# Altium footprint library IndoorGuide_Anchor_Device_V1.0.0_draft.PcbLib: 17 footprints (part 1 of 2)
Each footprint in its own frame and in the unit in brackets; x right, y up, seen from the top. Pads: shape width x height; smd on the part's side, far side on the other; paste and mask are expansions set on the pad; w line width, h text height; cw(c..) or ccw(c..) is an arc to the next point about the centre after c.
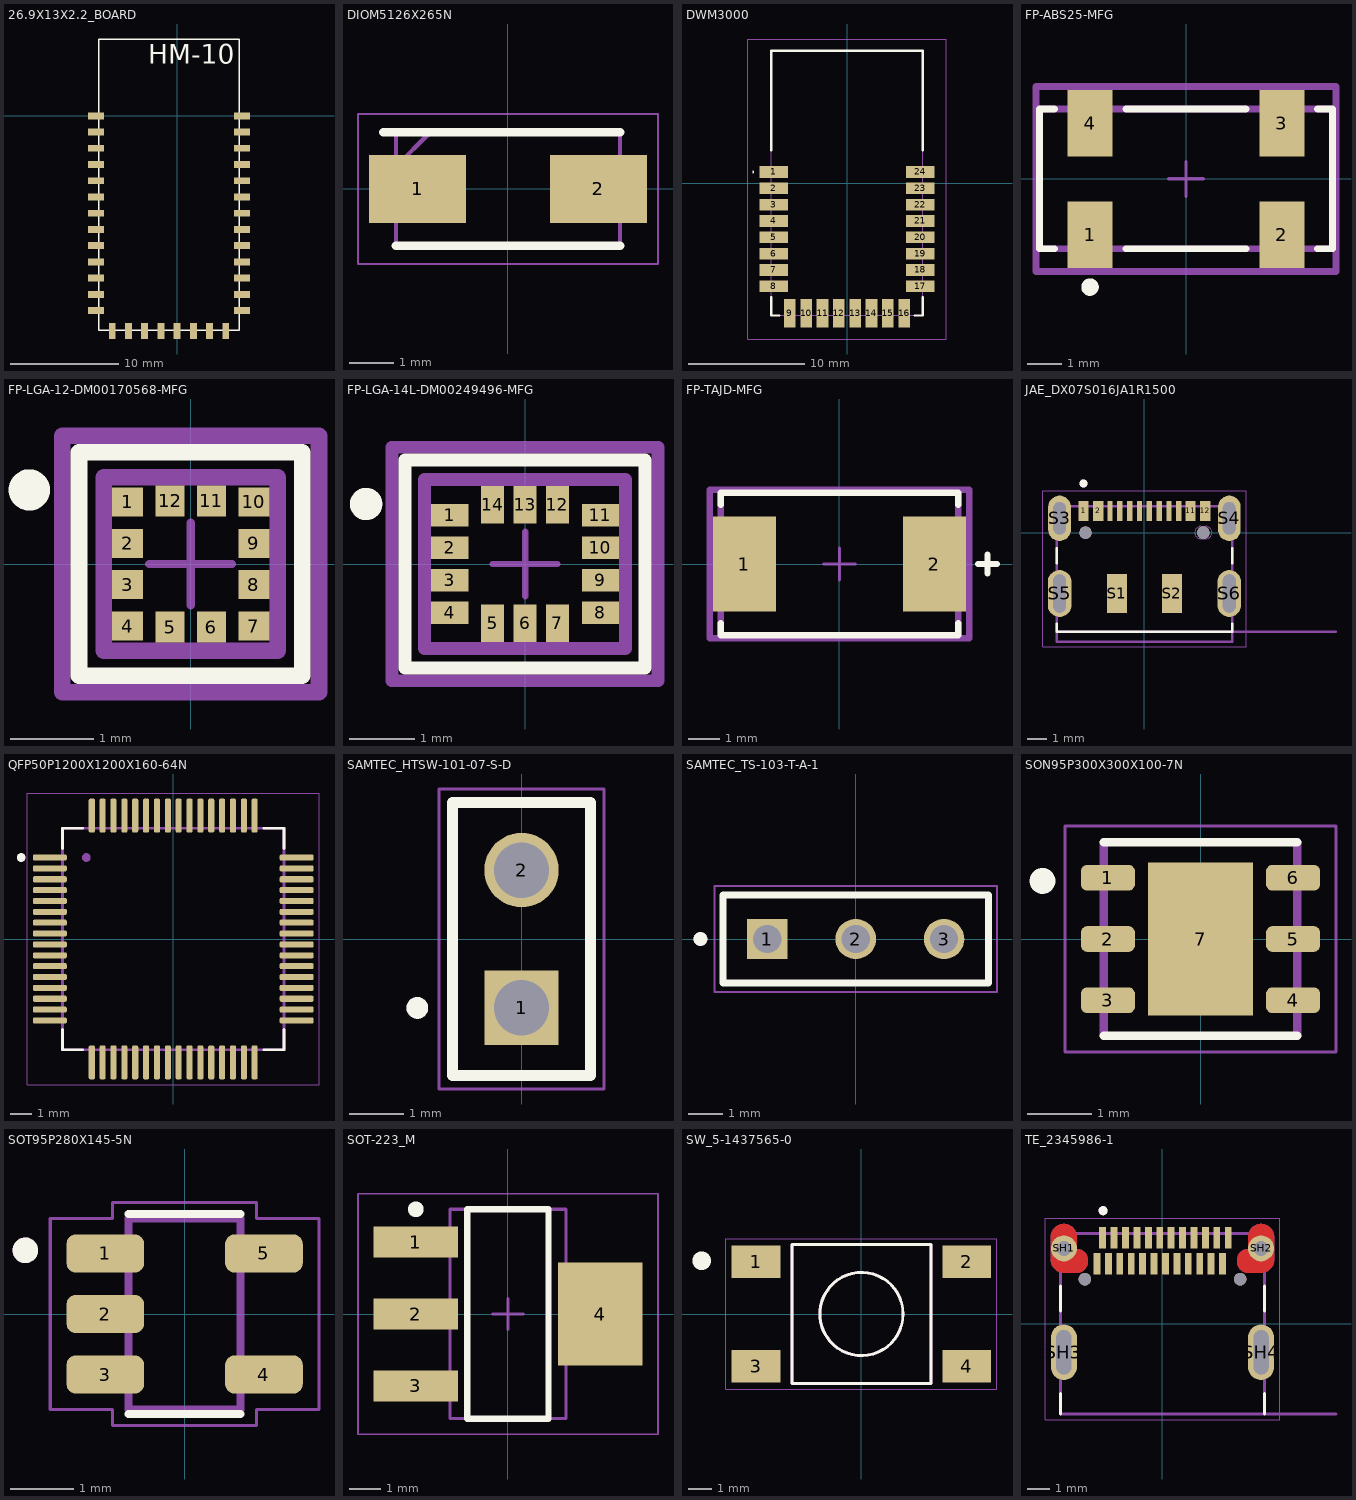
[diagram p0: the footprints below, top view; thin cyan lines are the x and y axes]

## 26.9X13X2.2_BOARD [mm]
pads (34):
  rect 1.5x0.635 smd: 1(-7.5,0) 2(-7.5,-1.5) 3(-7.5,-3) 4(-7.5,-4.5) 5(-7.5,-6) 6(-7.5,-7.5) 8(-7.5,-10.5) 9(-7.5,-12) 10(-7.5,-13.5) 11(-7.5,-15) 12(-7.5,-16.5) 13(-7.5,-18) 22(6,-18) 23(6,-16.5) 24(6,-15) 25(6,-13.5) 26(6,-12) 27(6,-10.5) 28(6,-9) 29(6,-7.5) 30(6,-6) 31(6,-4.5) 32(6,-3) 33(6,-1.5) 34(6,0) $7(-7.5,-9)
  rect 0.635x1.5 smd: 14(-6,-19.875) 15(-4.5,-19.875) 16(-3,-19.875) 17(-1.5,-19.875) 18(0,-19.875) 19(1.5,-19.875) 20(3,-19.875) 21(4.5,-19.875)
Top Overlay:
  lines w0.127: -7.25,-19.8 5.75,-19.8 5.75,7.1 -7.25,7.1 -7.25,-19.8
  text "HM-10" at -2.667,4.826 h1.78
3D body "step_temp.STEP": height 2.2, standoff 0, extent -7.262,-19.812 5.738,7.088

## DIOM5126X265N [mm]
pads (2):
  rect 2.2x1.55 smd: 1(-2.05,0) 2(2.05,0)
Top Overlay:
  lines w0.2: -2.825,1.288 2.538,1.288 ; -2.538,-1.288 2.538,-1.288
Mechanical 13:
  lines w0.05: -3.4,-1.7 3.4,-1.7 3.4,1.7 -3.4,1.7 -3.4,-1.7
  lines w0.1: -2.538,0.512 -1.762,1.288 ; -2.538,-1.288 2.538,-1.288 2.538,1.288 -2.538,1.288 -2.538,-1.288
3D body "step_temp.STEP": height 1.1, standoff 0, extent -2.6,-1.3 2.6,1.3

## DWM3000 [mm]
pads (24):
  rect 2.45x1 smd: 1(-6.295,0.95) 2(-6.295,-0.45) 3(-6.295,-1.85) 4(-6.295,-3.25) 5(-6.295,-4.65) 6(-6.295,-6.05) 7(-6.295,-7.45) 8(-6.295,-8.85) 17(6.295,-8.85) 18(6.295,-7.45) 19(6.295,-6.05) 20(6.295,-4.65) 21(6.295,-3.25) 22(6.295,-1.85) 23(6.295,-0.45) 24(6.295,0.95)
  rect 1x2.45 smd: 9(-4.9,-11.145) 10(-3.5,-11.145) 11(-2.1,-11.145) 12(-0.7,-11.145) 13(0.7,-11.145) 14(2.1,-11.145) 15(3.5,-11.145) 16(4.9,-11.145)
Top Overlay:
  lines w0.1: -8.1,0.95 cw(c-8.05,0.95) -8,0.95 cw(c-8.05,0.95) -8.1,0.95
  lines w0.2: -6.5,-9.8 -6.5,-11.35 -5.8,-11.35 ; -6.5,2.8 -6.5,11.35 6.5,11.35 6.5,2.8 ; 5.8,-11.35 6.5,-11.35 6.5,-9.8
Mechanical 15:
  lines w0.1: -6.5,-11.35 6.5,-11.35 6.5,11.35 -6.5,11.35 -6.5,-11.35
Mechanical 20:
  lines w0.1: -8.52,-13.37 8.52,-13.37 8.52,12.35 -8.52,12.35 -8.52,-13.37
3D body "DWM3000TR13--3DModel-STEP-56544.STEP": height 2.89, standoff 0, extent -6.5,-11.35 6.5,11.35

## FP-ABS25-MFG [mm]
pads (4):
  rect 1.3x1.9 smd paste+0 mask+0: 1(-2.75,-1.6) 2(2.75,-1.6) 3(2.75,1.6) 4(-2.75,1.6)
Top Overlay:
  circle w0.25: c-2.75,-3.1 r0.125
  lines w0.2: -3.775,-2 -4.2,-2 -4.2,2 -3.775,2 ; -1.725,-2 1.725,-2 ; -1.725,2 1.725,2 ; 3.775,-2 4.2,-2 4.2,2 3.775,2
Top 3D Body:
  lines w0.2: -4.2,-2 -4.2,2 4.2,2 4.2,-2 -4.2,-2
Top Courtyard:
  lines w0.2: -4.3,-2.65 -4.3,2.65 4.3,2.65 4.3,-2.65 -4.3,-2.65
Top Assembly:
  lines w0.2: -4.3,-2.65 -4.3,2.65 4.3,2.65 4.3,-2.65 -4.3,-2.65
  text ".Designator" at 0,0.188 h1
Top Component Center:
  lines w0.1: -0.5,0 0.5,0 ; 0,-0.5 0,0.5
3D body "Crys_Abracon_ABS25-100_000KHZ-T_eec.STEP": height 0.25, standoff 0, extent -4.3,-2.65 4.3,2.65

## FP-LGA-12-DM00170568-MFG [mm]
pads (12):
  rect 0.375x0.35 smd paste+0 mask+0: 1(-0.763,0.75) 2(-0.763,0.25) 3(-0.763,-0.25) 4(-0.763,-0.75) 7(0.763,-0.75) 8(0.763,-0.25) 9(0.763,0.25) 10(0.763,0.75)
  rect 0.35x0.375 smd paste+0 mask+0: 5(-0.25,-0.763) 6(0.25,-0.763) 11(0.25,0.763) 12(-0.25,0.763)
Top Overlay:
  circle w0.25: c-1.95,0.895 r0.125
  lines w0.2: -1.35,-1.35 -1.35,1.35 1.35,1.35 1.35,-1.35 -1.35,-1.35
Top 3D Body:
  lines w0.2: -1.05,-1.05 -1.05,1.05 1.05,1.05 1.05,-1.05 -1.05,-1.05
Top Courtyard:
  lines w0.2: -1.55,-1.55 -1.55,1.55 1.55,1.55 1.55,-1.55 -1.55,-1.55
Top Assembly:
  lines w0.2: -1.55,-1.55 -1.55,1.55 1.55,1.55 1.55,-1.55 -1.55,-1.55
  text ".Designator" at 0,0.188 h1
Top Component Center:
  lines w0.1: -0.5,0 0.5,0 ; 0,-0.5 0,0.5
3D body "IC_STMicroelectronics_LIS2MDLTR_eec.STEP": height 0.25, standoff 0, extent -1.55,-1.55 1.55,1.55

## FP-LGA-14L-DM00249496-MFG [mm]
pads (14):
  rect 0.575x0.35 smd paste-1000 mask+0: 1(-1.162,0.75) 2(-1.162,0.25) 3(-1.162,-0.25) 4(-1.162,-0.75) 8(1.162,-0.75) 9(1.162,-0.25) 10(1.162,0.25) 11(1.162,0.75)
  rect 0.35x0.575 smd paste-1000 mask+0: 5(-0.5,-0.913) 6(0,-0.913) 7(0.5,-0.913) 12(0.5,0.913) 13(0,0.913) 14(-0.5,0.913)
Top Overlay:
  circle w0.25: c-2.45,0.925 r0.125
  lines w0.2: -1.85,-1.6 1.85,-1.6 1.85,1.6 -1.85,1.6 -1.85,-1.6
Top Paste:
  rectangle: -1.427,0.598 -0.898,0.902
  rectangle: -1.427,0.098 -0.898,0.402
  rectangle: -1.427,-0.402 -0.898,-0.098
  rectangle: -1.427,-0.902 -0.898,-0.598
  rectangle: 0.898,-0.902 1.427,-0.598
  rectangle: 0.898,-0.402 1.427,-0.098
  rectangle: 0.898,0.098 1.427,0.402
  rectangle: 0.898,0.598 1.427,0.902
  rectangle: -0.652,-1.177 -0.348,-0.648
  rectangle: -0.152,-1.177 0.152,-0.648
  rectangle: 0.348,-1.177 0.652,-0.648
  rectangle: 0.348,0.648 0.652,1.177
  rectangle: -0.152,0.648 0.152,1.177
  rectangle: -0.652,0.648 -0.348,1.177
Top 3D Body:
  lines w0.2: -1.55,-1.3 1.55,-1.3 1.55,1.3 -1.55,1.3 -1.55,-1.3
Top Courtyard:
  lines w0.2: -2.05,-1.8 2.05,-1.8 2.05,1.8 -2.05,1.8 -2.05,-1.8
Top Assembly:
  lines w0.2: -2.05,-1.8 2.05,-1.8 2.05,1.8 -2.05,1.8 -2.05,-1.8
  text ".Designator" at 0,-0.001 h1
Top Component Center:
  lines w0.1: -0.5,0 0.5,0 ; 0,-0.5 0,0.5
3D body "IC_STMicroelectronics_LSM6DSRTR_eec.STEP": height 0.25, standoff 0, extent -2.05,-1.8 2.05,1.8

## FP-TAJD-MFG [mm]
pads (2):
  rect 2x3 smd paste+0 mask+0: 1(-3,0) 2(3,0)
Top Overlay:
  lines w0.2: -3.75,-1.875 -3.75,-2.25 3.75,-2.25 3.75,-1.875 ; -3.75,1.875 -3.75,2.25 3.75,2.25 3.75,1.875 ; 4.375,0 4.975,0 ; 4.675,-0.3 4.675,0.3
Top 3D Body:
  lines w0.2: -3.75,-2.25 -3.75,2.25 3.75,2.25 3.75,-2.25 -3.75,-2.25
Top Courtyard:
  lines w0.2: -4.1,-2.35 -4.1,2.35 4.1,2.35 4.1,-2.35 -4.1,-2.35
Top Assembly:
  lines w0.2: -4.1,-2.35 -4.1,2.35 4.1,2.35 4.1,-2.35 -4.1,-2.35
  text ".Designator" at 0,-0.001 h1
Top Component Center:
  lines w0.1: -0.5,0 0.5,0 ; 0,-0.5 0,0.5
3D body "Cap_AVX_TAJD108K004RNJ_eec.STEP": height 0.25, standoff 0, extent -4.1,-2.35 4.1,2.35

## JAE_DX07S016JA1R1500 [mm]
pads (21):
  rect 0.52x1 smd: 1(-3.1,1.1) 2(-2.35,1.1) 11(2.35,1.1) 12(3.1,1.1)
  rect 0.27x1 smd: 3(-1.75,1.1) 4(-1.25,1.1) 5(-0.75,1.1) 6(-0.25,1.1) 7(0.25,1.1) 8(0.75,1.1) 9(1.25,1.1) 10(1.75,1.1)
  rect 1x2 smd: S1(-1.4,-3.1) S2(1.4,-3.1)
  oval 1.158x2.316 hole 0.65 slot 1.65 at 90 deg: S3(-4.32,0.725) S4(4.32,0.725)
  oval 1.2x2.4 hole 0.65 slot 1.95 at 90 deg: S5(-4.32,-3.1) S6(4.32,-3.1)
  round 0.63 hole 0.63 unplated: ""(-3,0) ""(3,0)
  round 0.6 hole 0.6 unplated: ""(3,0)
Top Overlay:
  circle w0.2: c-3.1,2.5 r0.1
  lines w0.127: -4.47,-4.63 -4.47,-5.05 4.47,-5.05 4.47,-4.63 ; -4.47,-1.57 -4.47,-0.805 ; 4.47,-1.57 4.47,-0.805
Mechanical 1:
  lines w0: 2.56,0 ccw(c2.875,0) 2.875,-0.315 3.125,-0.315 ccw(c3.125,0) 3.44,0 ccw(c3.125,0) 3.125,0.315 2.875,0.315 ccw(c2.875,0) 2.56,0
Mechanical 13:
  circle w0.2: c-3.1,2.5 r0.1
  lines w0.127: 9.75,-5.05 4.47,-5.05 ; -4.47,-5.05 -4.47,-5.55 4.47,-5.55 4.47,-5.05 ; -4.47,-5.05 -4.47,1.35 4.47,1.35 4.47,-5.05 ; -4.47,-5.05 4.47,-5.05
  text "PCB EDGE" at 5.5,-4.75 h0.61
Mechanical 15:
  lines w0.05: -5.17,-5.8 -5.17,2.135 5.17,2.135 5.17,-5.8 -5.17,-5.8
3D body "usbc port 3d model.STEP": height 3.31, standoff -1.05, extent -4.47,-5.609 4.47,1.291

## QFP50P1200X1200X160-64N [mm]
pads (64):
  rrect50% 1.56x0.28 smd: 1(-5.68,3.75) 2(-5.68,3.25) 3(-5.68,2.75) 4(-5.68,2.25) 5(-5.68,1.75) 6(-5.68,1.25) 7(-5.68,0.75) 8(-5.68,0.25) 9(-5.68,-0.25) 10(-5.68,-0.75) 11(-5.68,-1.25) 12(-5.68,-1.75) 13(-5.68,-2.25) 14(-5.68,-2.75) 15(-5.68,-3.25) 16(-5.68,-3.75) 33(5.68,-3.75) 34(5.68,-3.25) 35(5.68,-2.75) 36(5.68,-2.25) 37(5.68,-1.75) 38(5.68,-1.25) 39(5.68,-0.75) 40(5.68,-0.25) 41(5.68,0.25) 42(5.68,0.75) 43(5.68,1.25) 44(5.68,1.75) 45(5.68,2.25) 46(5.68,2.75) 47(5.68,3.25) 48(5.68,3.75)
  rrect50% 0.28x1.56 smd: 17(-3.75,-5.68) 18(-3.25,-5.68) 19(-2.75,-5.68) 20(-2.25,-5.68) 21(-1.75,-5.68) 22(-1.25,-5.68) 23(-0.75,-5.68) 24(-0.25,-5.68) 25(0.25,-5.68) 26(0.75,-5.68) 27(1.25,-5.68) 28(1.75,-5.68) 29(2.25,-5.68) 30(2.75,-5.68) 31(3.25,-5.68) 32(3.75,-5.68) 49(3.75,5.68) 50(3.25,5.68) 51(2.75,5.68) 52(2.25,5.68) 53(1.75,5.68) 54(1.25,5.68) 55(0.75,5.68) 56(0.25,5.68) 57(-0.25,5.68) 58(-0.75,5.68) 59(-1.25,5.68) 60(-1.75,5.68) 61(-2.25,5.68) 62(-2.75,5.68) 63(-3.25,5.68) 64(-3.75,5.68)
Top Overlay:
  circle w0.2: c-7,3.75 r0.1
  lines w0.127: -5.1,-4.17 -5.1,-5.1 -4.17,-5.1 ; -5.1,4.17 -5.1,5.1 -4.17,5.1 ; 4.17,-5.1 5.1,-5.1 5.1,-4.17 ; 4.17,5.1 5.1,5.1 5.1,4.17
Mechanical 13:
  circle w0.2: c-4,3.75 r0.1
  lines w0.127: -5.1,-5.1 5.1,-5.1 5.1,5.1 -5.1,5.1 -5.1,-5.1
Mechanical 15:
  lines w0.05: -6.71,-6.71 6.71,-6.71 6.71,6.71 -6.71,6.71 -6.71,-6.71
3D body "stm32f446ret6.stp": height 1.48, standoff 0, extent -6,-6.031 6,5.969

## SAMTEC_HTSW-101-07-S-D [mm]
pads (2):
  rect 1.37x1.37 / inner round 1.37 / far side rect 1.37x1.37 hole 1.02: 1(0,-1.27)
  round 1.37 hole 1.02: 2(0,1.27)
Top Overlay:
  circle w0.2: c-1.92,-1.27 r0.1
  lines w0.2: -1.27,-2.515 -1.27,2.515 1.27,2.515 1.27,-2.515 -1.27,-2.515
Mechanical 13:
  circle w0.2: c-1.92,-1.27 r0.1
  lines w0.1: -1.27,-2.515 -1.27,2.515 1.27,2.515 1.27,-2.515 -1.27,-2.515
Mechanical 15:
  lines w0.05: -1.52,-2.765 -1.52,2.765 1.52,2.765 1.52,-2.765 -1.52,-2.765
3D body "HTSW-101-07-S-D.stp": height 8.38, standoff -2.54, extent -1.27,-2.642 1.27,2.388
3D body "Jumper.step": height 8.5, standoff 2.5, extent -1.13,-2.727 1.27,2.473

## SAMTEC_TS-103-T-A-1 [mil]
pads (3):
  rect 45.78x45.78 / inner round 45.78 / far side rect 45.78x45.78 hole 32: 1(-100,0)
  round 45.78 hole 32: 2(0,0) 3(100,0)
Top Overlay:
  circle w7.87: c-175.59,0 r3.94
  lines w7.87: -150,-50 -150,50 150,50 150,-50 -150,-50
Mechanical 13:
  circle w7.87: c-175.59,0 r3.94
  lines w3.94: -150,-50 -150,50 ; -150,-50 150,-50 ; -150,-50 -150,50 ; -150,50 150,50 ; -150,50 150,50 ; 150,-50 150,50 ; 150,-50 150,50
Mechanical 15:
  lines w1.97: -159.84,-59.84 -159.84,59.84 159.84,59.84 159.84,-59.84 -159.84,-59.84
3D body "TS-103-T-A-1.stp": height 326, standoff -204, extent -153,-50 155,50
3D body "Jumper.step": height 334.65, standoff 98.43, extent -150,-47.24 54.72,47.24

## SON95P300X300X100-7N [mm]
pads (7):
  rrect50% 0.84x0.4 smd: 1(-1.435,0.95) 2(-1.435,0) 3(-1.435,-0.95) 4(1.435,-0.95) 5(1.435,0) 6(1.435,0.95)
  rect 1.625x2.365 smd paste-2: 7(0,0)
Top Overlay:
  circle w0.2: c-2.45,0.9 r0.1
  lines w0.127: -1.5,-1.5 1.5,-1.5 ; -1.5,1.5 1.5,1.5
Top Paste:
  region: 0.57,-0.83 -0.57,-0.83 -0.57,0.83 0.57,0.83
Mechanical 13:
  lines w0.127: -1.5,-1.5 -1.5,1.5 ; 1.5,-1.5 1.5,1.5
Mechanical 15:
  lines w0.05: -2.1,-1.75 -2.1,1.75 2.1,1.75 2.1,-1.75 -2.1,-1.75
3D body "step_temp.STEP": height 1.02, standoff 0.02, extent -1.5,-1.5 1.5,1.5

## SOT95P280X145-5N [mm]
pads (5):
  rrect50% 1.22x0.6 smd: 1(-1.245,0.95) 2(-1.245,0) 3(-1.245,-0.95) 4(1.245,-0.95) 5(1.245,0.95)
Top Overlay:
  circle w0.2: c-2.5,1 r0.1
  lines w0.127: -0.88,-1.57 0.88,-1.57 ; -0.88,1.57 0.88,1.57
Mechanical 13:
  circle w0.2: c-2.5,1 r0.1
  lines w0.127: -0.88,-1.5 0.88,-1.5 0.88,1.5 -0.88,1.5 -0.88,-1.5
Mechanical 15:
  lines w0.05: -2.11,-1.5 -2.11,1.5 -1.13,1.5 -1.13,1.75 1.13,1.75 1.13,1.5 2.11,1.5 2.11,-1.5 1.13,-1.5 1.13,-1.75 -1.13,-1.75 -1.13,-1.5 -2.11,-1.5
3D body "step_temp.STEP": height 1.45, standoff 0, extent -1.35,-1.45 1.35,1.45

## SOT-223_M [mm] "SOT223, 4-Leads, Body 6.5x3.5mm, Pitch 2.3mm, Lead Span 7mm, IPC Low Density"
height 1.8
pads (4):
  rect 2.7x1 smd: 1(-2.95,2.3) 2(-2.95,0) 3(-2.95,-2.3)
  rect 2.7x3.3 smd: 4(2.95,0)
Top Overlay:
  circle w0.25: c-2.95,3.35 r0.125
  lines w0.2: -1.3,-3.35 -1.3,3.35 1.3,3.35 1.3,-3.35 -1.3,-3.35
Mechanical 13:
  lines w0.1: -1.85,-3.35 -1.85,3.35 1.85,3.35 1.85,-3.35 -1.85,-3.35
Mechanical 15:
  lines w0.05: -4.8,-3.85 -4.8,3.85 4.8,3.85 4.8,-3.85 -4.8,-3.85
  lines w0.1: -0.5,0 0.5,0 ; 0,-0.5 0,0.5
3D body: height 1.8, standoff 0.02, extent -1.85,-3.35 1.85,3.35

## SW_5-1437565-0 [mm]
pads (4):
  rect 2.1x1.4 smd: 1(-4.55,2.25) 2(4.55,2.25) 3(-4.55,-2.25) 4(4.55,-2.25)
Top Overlay:
  circle w0.4: c-6.9,2.3 r0.2
  circle w0.127: c0,0 r1.796
  lines w0.127: -3,-3 3,-3 3,3 -3,3 -3,-3
Mechanical 13:
  circle w0.127: c0,0 r1.796
  lines w0.127: -3,-3 3,-3 3,3 -3,3 -3,-3
Mechanical 15:
  lines w0.05: -5.85,-3.25 -5.85,3.25 5.85,3.25 5.85,-3.25 -5.85,-3.25
3D body "step_temp.STEP": height 7.26, standoff 0, extent -5,-3 5,3

## TE_2345986-1 [mm]
height 3.16
pads (30):
  rect 0.3x0.95 smd: A1(-2.62,3.765) A2(-2.12,3.765) A3(-1.62,3.765) A4(-1.12,3.765) A5(-0.62,3.765) A6(-0.12,3.765) A7(0.38,3.765) A8(0.88,3.765) A9(1.38,3.765) A10(1.88,3.765) A11(2.38,3.765) A12(2.88,3.765) B1(2.63,2.625) B2(2.13,2.625) B3(1.63,2.625) B4(1.13,2.625) B5(0.63,2.625) B6(0.13,2.625) B7(-0.37,2.625) B8(-0.87,2.625) B9(-1.37,2.625) B10(-1.87,2.625) B11(-2.37,2.625) B12(-2.87,2.625)
  round 1.14 hole 0.65 mask+0: SH1(-4.32,3.3) SH2(4.32,3.3)
  oval 1.14x2.44 hole 0.65 slot 1.95 at 90 deg: SH3(-4.32,-1.25) SH4(4.32,-1.25)
  round 0.55 hole 0.55 unplated: ""(-3.4,1.95) ""(3.4,1.95)
Top Layer:
  region: 155 vertices and 0 holes, not listed, extent 3.272,2.23 4.89,4.37
  region: 155 vertices and 0 holes, not listed, extent -4.89,2.23 -3.272,4.37
Bottom Layer:
  region: 155 vertices and 0 holes, not listed, extent 3.272,2.23 4.89,4.37
  region: 155 vertices and 0 holes, not listed, extent -4.89,2.23 -3.272,4.37
Top Overlay:
  circle w0.2: c-2.6,4.95 r0.1
  lines w0.127: -4.47,-3.95 -4.47,-3.05 ; -4.47,0.55 -4.47,1.65 ; 4.47,-3.95 4.47,-3.05 ; 4.47,0.55 4.47,1.65
Top Solder:
  drawing of 2 lines, arcs and shapes, not listed
Bottom Solder:
  drawing of 2 lines, arcs and shapes, not listed
Mechanical 1:
  lines w0: -4.645,2.8 ccw(c-4.32,2.8) -4.32,2.475 -3.72,2.475 ccw(c-3.72,2.8) -3.395,2.8 ccw(c-3.72,2.8) -3.72,3.125 -3.995,3.125 -3.995,3.8 ccw(c-4.32,3.8) -4.32,4.125 ccw(c-4.32,3.8) -4.645,3.8 -4.645,2.8 ; 3.395,2.8 cw(c3.72,2.8) 3.72,3.125 3.995,3.125 3.995,3.8 cw(c4.32,3.8) 4.32,4.125 cw(c4.32,3.8) 4.645,3.8 4.645,2.8 cw(c4.32,2.8) 4.32,2.475 3.72,2.475 cw(c3.72,2.8) 3.395,2.8
Mechanical 13:
  circle w0.2: c-2.6,4.95 r0.1
  lines w0.127: 7.6,-3.95 4.47,-3.95 ; 4.47,-3.95 -4.47,-3.95 -4.47,3.95 4.47,3.95 4.47,-3.95
  text "PCB Edge" at 5.3,-3.75 h1
Mechanical 15:
  lines w0.05: -5.14,-4.2 -5.14,4.62 5.14,4.62 5.14,-4.2 -5.14,-4.2
3D body "step_temp.STEP": height 1.58, standoff -2.18, extent -4.47,-3.937 4.47,4.163